# EAGLE library part SI3493DDV-T1-GE3 (library SI3493DDV-T1-GE3)
MOSFET -20V Vds 8V Vgs TSOP-6 Source: Datasheet <https://www.vishay.com/docs/74735/si3493ddv.pdf>
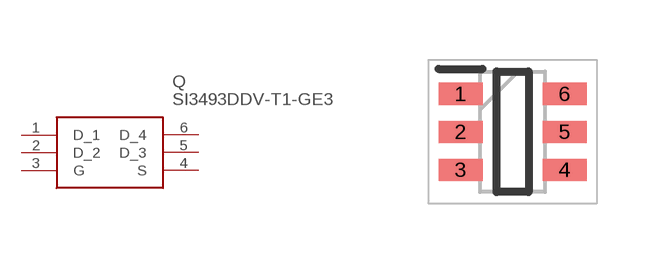
[diagram p0: symbol with the pads of SOT95P284X110-6N; footprint SOT95P284X110-6N]

Designator prefix Q

## SI3493DDV-T1-GE3 (Description: MOSFET -20V Vds 8V Vgs TSOP-6; Height: 1.1mm; Manufacturer_Name: Vishay; Manufacturer_Part_Number: SI3493DDV-T1-GE3; Mouser_Part_Number: 78-SI3493DDV-T1-GE3; Mouser_Price-Stock: https://www.mouser.co.uk/ProductDetail/Vishay-Siliconix/SI3493DDV-T1-GE3?qs=Mv7BduZupUhpV99w3U%2FyBA%3D%3D)  [SOT95P284X110-6N]
1  D_1
2  D_2
3  G
4  S
5  D_3
6  D_4

## Footprint SOT95P284X110-6N (pad centres in mm)
MO-193C
smd 1.1 x 0.55: 1 -1.3,0.95; 2 -1.3,0; 3 -1.3,-0.95; 4 1.3,-0.95; 5 1.3,0; 6 1.3,0.95